# Altium footprint library 046841015100846.PcbLib: 1 footprints
Each footprint in its own frame and in the unit in brackets; x right, y up, seen from the top. Pads: shape width x height; smd on the part's side, far side on the other; paste and mask are expansions set on the pad; w line width, h text height; cw(c..) or ccw(c..) is an arc to the next point about the centre after c.
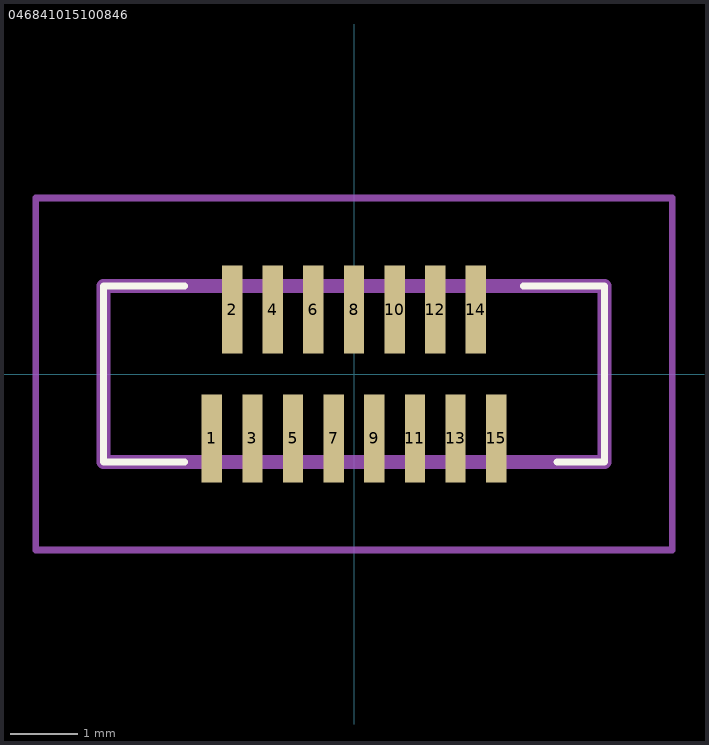
[diagram p0: the footprint, top view; thin cyan lines are the x and y axes]

## 046841015100846 [mm]
pads (15):
  rect 0.3x1.3 smd: 1(-2.1,-0.95) 2(-1.8,0.95) 3(-1.5,-0.95) 4(-1.2,0.95) 5(-0.9,-0.95) 6(-0.6,0.95) 7(-0.3,-0.95) 8(0,0.95) 9(0.3,-0.95) 10(0.6,0.95) 11(0.9,-0.95) 12(1.2,0.95) 13(1.5,-0.95) 14(1.8,0.95) 15(2.1,-0.95)
Top Overlay:
  lines w0.1: -2.5,-1.3 -3.7,-1.3 -3.7,1.3 -2.5,1.3 ; 2.5,1.3 3.7,1.3 3.7,-1.3 3,-1.3
Mechanical 15:
  lines w0.2: -3.7,-1.3 3.7,-1.3 3.7,1.3 -3.7,1.3 -3.7,-1.3
Mechanical 20:
  lines w0.1: -4.7,-2.6 4.7,-2.6 4.7,2.6 -4.7,2.6 -4.7,-2.6